# Altium footprint library RHDR19W69P0X254_1X19_4876X250X870P.PcbLib: 1 footprints
Each footprint in its own frame and in the unit in brackets; x right, y up, seen from the top. Pads: shape width x height; smd on the part's side, far side on the other; paste and mask are expansions set on the pad; w line width, h text height; cw(c..) or ccw(c..) is an arc to the next point about the centre after c.
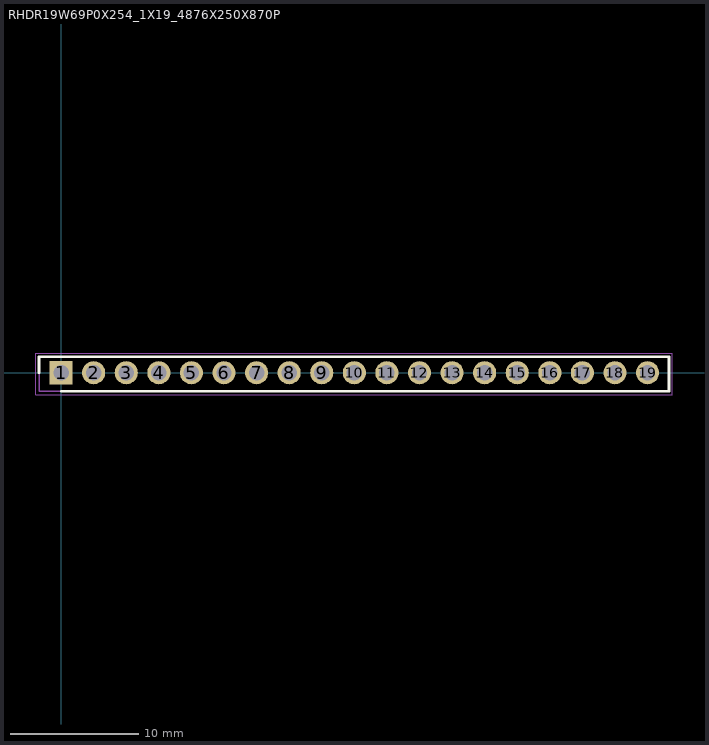
[diagram p0: the footprint, top view; thin cyan lines are the x and y axes]

## RHDR19W69P0X254_1X19_4876X250X870P [mm]
pads (19):
  rect 1.8x1.8 / inner round 1.8 / far side rect 1.8x1.8 hole 1.2: 1(0,0)
  round 1.8 hole 1.2: 2(2.54,0) 3(5.08,0) 4(7.62,0) 5(10.16,0) 6(12.7,0) 7(15.24,0) 8(17.78,0) 9(20.32,0) 10(22.86,0) 11(25.4,0) 12(27.94,0) 13(30.48,0) 14(33.02,0) 15(35.56,0) 16(38.1,0) 17(40.64,0) 18(43.18,0) 19(45.72,0)
Top Overlay:
  lines w0.2: -1.72,0 -1.72,1.25 47.39,1.25 47.39,-1.45 0,-1.45
Mechanical 15:
  lines w0.1: -1.72,-1.45 -1.72,1.25 47.39,1.25 47.39,-1.45 -1.72,-1.45
Mechanical 20:
  lines w0.05: -1.97,-1.7 -1.97,1.5 47.64,1.5 47.64,-1.7 -1.97,-1.7
3D body "SSK02-FPH-254-A19.stp": height 8.7, standoff -3.3, extent -1.52,-1.25 47.24,1.25